# Altium footprint library S56_MLD_tiny.PcbLib: 13 footprints
Each footprint in its own frame and in the unit in brackets; x right, y up, seen from the top. Pads: shape width x height; smd on the part's side, far side on the other; paste and mask are expansions set on the pad; w line width, h text height; cw(c..) or ccw(c..) is an arc to the next point about the centre after c.
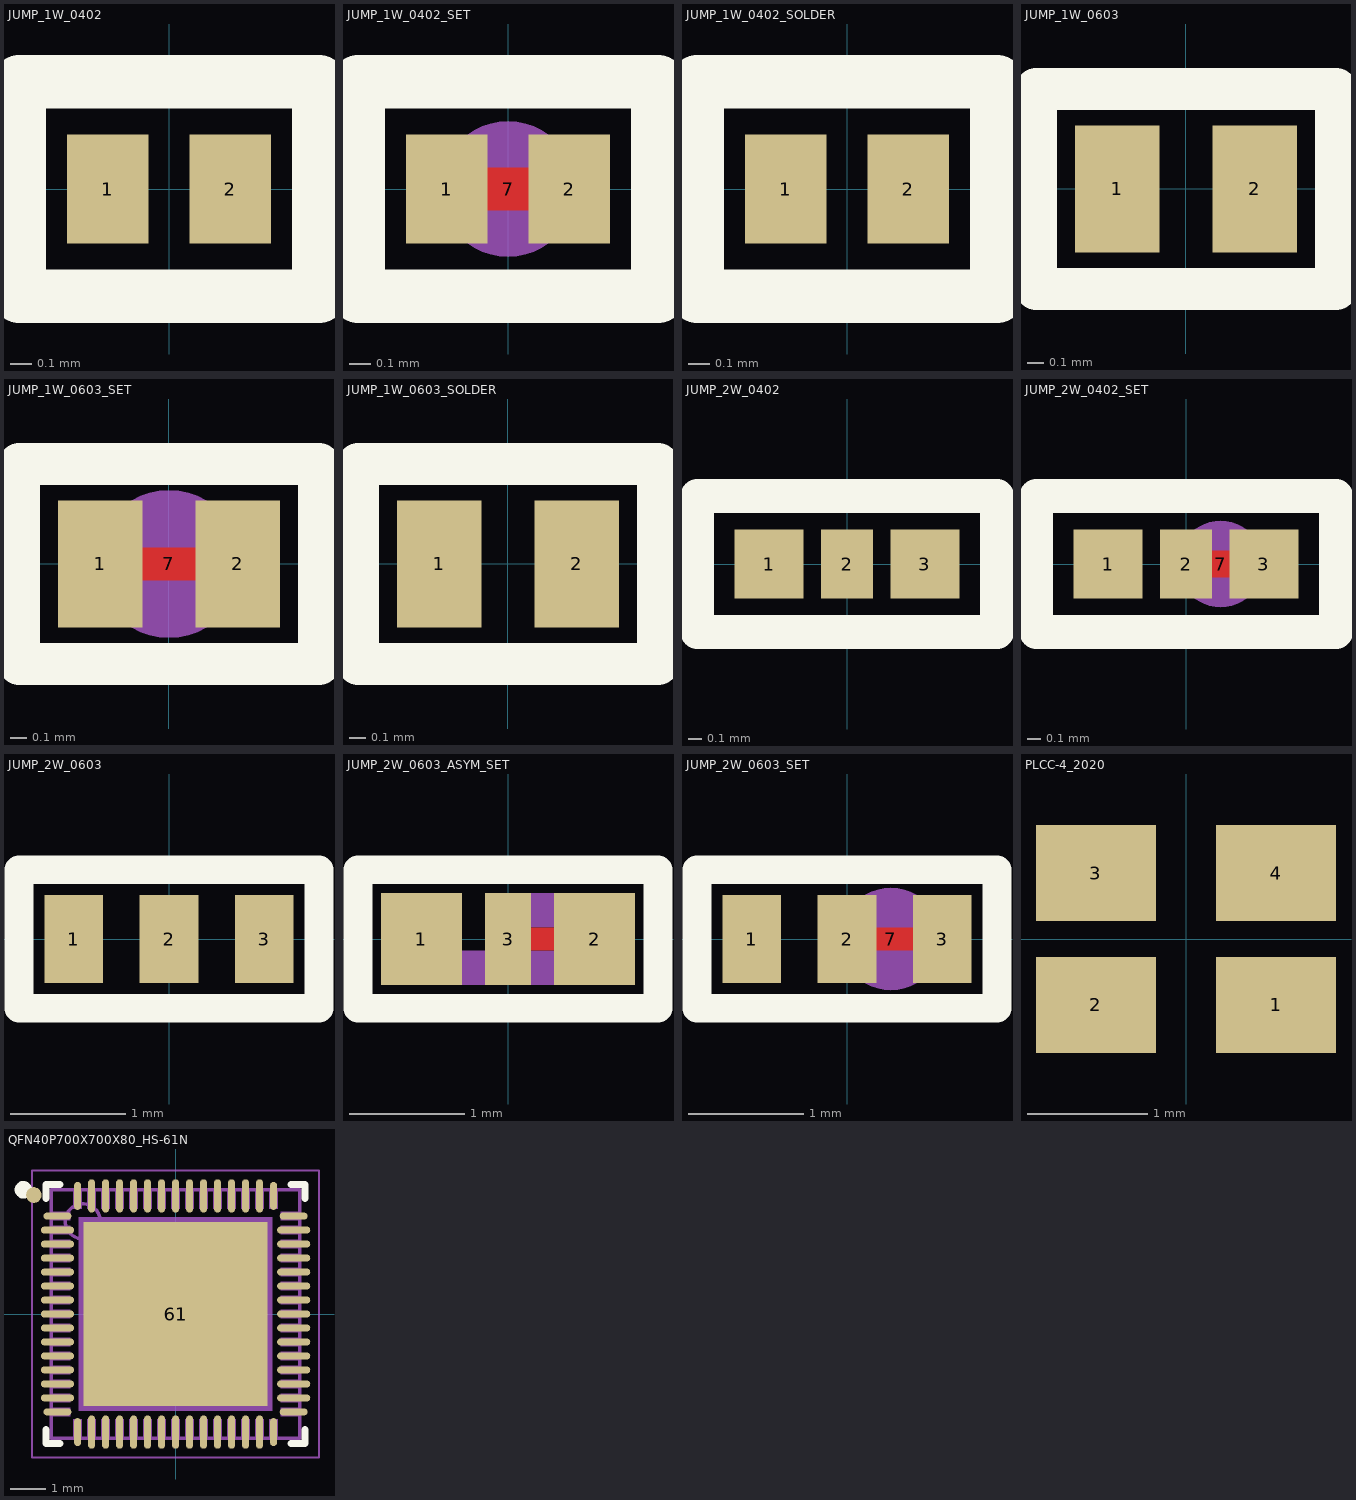
[diagram p0: the footprints below, top view; thin cyan lines are the x and y axes]

## JUMP_1W_0402 [mil]
pads (2):
  rect 15x20 smd paste-39.37: 1(-11.25,0) 2(11.25,0)
Top Overlay:
  lines w9.84: -27.56,-19.68 -27.56,19.68 27.56,19.68 27.56,-19.68 -27.56,-19.68
Top Solder:
  rectangle: -19.68,-11.81 19.68,11.81

## JUMP_1W_0402_SET [mil]
pads (3):
  rect 15x20 smd paste-39.37: 1(-11.25,0) 2(11.25,0)
  round 25 on Mech2: 7(0,0)
Top Layer:
  lines w7.87: -11.25,0 11.25,0
Top Overlay:
  lines w9.84: -27.56,-19.68 -27.56,19.68 27.56,19.68 27.56,-19.68 -27.56,-19.68
Top Solder:
  rectangle: -19.68,-11.81 19.68,7.87

## JUMP_1W_0402_SOLDER [mil]
pads (2):
  rect 15x20 smd paste-39.37: 1(-11.25,0) 2(11.25,0)
Top Overlay:
  lines w9.84: -27.56,-19.68 -27.56,19.68 27.56,19.68 27.56,-19.68 -27.56,-19.68
Top Paste:
  region: 10.83,10.83 -10.83,10.83 -10.83,-10.83 10.83,-10.83
Top Solder:
  rectangle: -19.68,-11.81 19.68,11.81
3D body: height 9.84, standoff -9.84, extent -9.84,-9.69 9.85,9.7

## JUMP_1W_0603 [mil]
pads (2):
  rect 20x30 smd paste-39.37: 1(-16.25,0) 2(16.25,0)
Top Overlay:
  lines w9.84: -35.43,-23.62 -35.43,23.62 35.43,23.62 35.43,-23.62 -35.43,-23.62
Top Solder:
  rectangle: -11.81,-17.72 11.81,17.72

## JUMP_1W_0603_SET [mil]
pads (3):
  rect 20x30 smd paste-39.37: 1(-16.25,0) 2(16.25,0)
  round 35 on Mech2: 7(0,0)
Top Layer:
  lines w7.87: -16.25,0 16.25,0
Top Overlay:
  lines w9.84: -35.43,-23.62 35.43,-23.62 35.43,23.62 -35.43,23.62 -35.43,-23.62
Top Solder:
  rectangle: -11.81,-17.72 11.81,17.72

## JUMP_1W_0603_SOLDER [mil]
pads (2):
  rect 20x30 smd paste-39.37: 1(-16.25,0) 2(16.25,0)
Top Overlay:
  lines w9.84: -35.43,-23.62 35.43,-23.62 35.43,23.62 -35.43,23.62 -35.43,-23.62
Top Solder:
  rectangle: -11.81,-17.72 11.81,17.72
3D body: height 15.75, standoff -15.75, extent -15.75,-15.75 15.75,15.75

## JUMP_2W_0402 [mil]
pads (3):
  rect 20x20 smd paste-39.37: 1(-22.5,0) 3(22.5,0)
  rect 15x20 smd paste-39.37: 2(0,0)
Top Overlay:
  lines w9.84: -43.31,-19.68 -43.31,19.68 43.31,19.68 43.31,-19.68 -43.31,-19.68
Top Solder:
  rectangle: -35.43,-11.81 35.43,11.81

## JUMP_2W_0402_SET [mil]
pads (4):
  rect 20x20 smd paste-39.37: 1(-22.5,0) 3(22.5,0)
  rect 15x20 smd paste-39.37: 2(0,0)
  round 25 on Mech2: 7(10,0)
Top Layer:
  lines w7.87: 0,0 22.5,0
Top Overlay:
  lines w9.84: -43.31,-19.68 -43.31,19.68 43.31,19.68 43.31,-19.68 -43.31,-19.68
Top Solder:
  rectangle: -35.43,-11.81 35.43,11.81

## JUMP_2W_0603 [mil]
pads (3):
  rect 20x30 smd paste-39.37: 1(-32.5,0) 2(0,0) 3(32.5,0)
Top Overlay:
  lines w9.84: -51.18,-23.62 51.18,-23.62 51.18,23.62 -51.18,23.62 -51.18,-23.62
Top Solder:
  rectangle: 3.94,-17.72 27.56,17.72
  rectangle: -27.56,-17.72 -3.94,17.72

## JUMP_2W_0603_ASYM_SET [mm]
pads (3):
  rect 0.7x0.8 smd paste-1: 1(-0.75,0) 2(0.75,0)
  rect 0.4x0.8 smd paste-1: 3(0,0)
Top Layer:
  lines w0.2: 0.2,0 0.8,0
Top Overlay:
  lines w0.25: -1.3,-0.6 1.3,-0.6 1.3,0.6 0.5,0.6 -1.3,0.6 -1.3,-0.6
Mechanical 2:
  region: 0.8,-0.1 -0.8,-0.1 -0.8,-0.4 0.8,-0.4
  region: 0.9,0.4 -0.1,0.4 -0.1,0.1 0.9,0.1

## JUMP_2W_0603_SET [mil]
pads (4):
  rect 20x30 smd paste-39.37: 1(-32.5,0) 2(0,0) 3(32.5,0)
  round 35 on Mech2: 7(15,0)
Top Layer:
  lines w7.87: 0,0 32.5,0
Top Overlay:
  lines w9.84: -51.18,-23.62 51.18,-23.62 51.18,23.62 -51.18,23.62 -51.18,-23.62
Top Solder:
  rectangle: 3.94,-17.72 27.56,17.72
  rectangle: -27.56,-17.72 -3.94,17.72

## PLCC-4_2020 [mm]
pads (4):
  rect 1x0.8 smd: 1(0.75,-0.55) 2(-0.75,-0.55) 3(-0.75,0.55) 4(0.75,0.55)
3D body: height 0.4, standoff 0, extent -1,-1 1,1
3D body: height 0.9, standoff 0.4, extent -1,-1 1,1

## QFN40P700X700X80_HS-61N [mm] "QFN, 60-Leads, Body 7.00x7.00mm, Pitch 0.40mm, Thermal Pad 5.25x5.25mm, IPC Medium Density"
height 0.8
pads (62):
  oval 0.8x0.2 smd: 1(-3.375,2.8) 15(-3.375,-2.8) 31(3.375,-2.8) 45(3.375,2.8)
  oval 0.95x0.2 smd: 2(-3.375,2.4) 3(-3.375,2) 4(-3.375,1.6) 5(-3.375,1.2) 6(-3.375,0.8) 7(-3.375,0.4) 8(-3.375,0) 9(-3.375,-0.4) 10(-3.375,-0.8) 11(-3.375,-1.2) 12(-3.375,-1.6) 13(-3.375,-2) 14(-3.375,-2.4) 32(3.375,-2.4) 33(3.375,-2) 34(3.375,-1.6) 35(3.375,-1.2) 36(3.375,-0.8) 37(3.375,-0.4) 38(3.375,0) 39(3.375,0.4) 40(3.375,0.8) 41(3.375,1.2) 42(3.375,1.6) 43(3.375,2) 44(3.375,2.4)
  oval 0.2x0.8 smd: 16(-2.8,-3.375) 30(2.8,-3.375) 46(2.8,3.375) 60(-2.8,3.375)
  oval 0.2x0.95 smd: 17(-2.4,-3.375) 18(-2,-3.375) 19(-1.6,-3.375) 20(-1.2,-3.375) 21(-0.8,-3.375) 22(-0.4,-3.375) 23(0,-3.375) 24(0.4,-3.375) 25(0.8,-3.375) 26(1.2,-3.375) 27(1.6,-3.375) 28(2,-3.375) 29(2.4,-3.375) 47(2.4,3.375) 48(2,3.375) 49(1.6,3.375) 50(1.2,3.375) 51(0.8,3.375) 52(0.4,3.375) 53(0,3.375) 54(-0.4,3.375) 55(-0.8,3.375) 56(-1.2,3.375) 57(-1.6,3.375) 58(-2,3.375) 59(-2.4,3.375)
  rect 5.25x5.25 smd paste-20: 61(0,0)
  round 0.45 smd: ""(-4.05,3.4)
Top Overlay:
  circle w0.25: c-4.35,3.55 r0.125
  lines w0.2: -3.7,-3.3 -3.7,-3.7 -3.3,-3.7 ; -3.7,3.3 -3.7,3.7 -3.3,3.7 ; 3.3,-3.7 3.7,-3.7 3.7,-3.3 ; 3.3,3.7 3.7,3.7 3.7,3.3
Top Paste:
  rectangle: -2.5,1.6 -1.6,2.5
  rectangle: -1.1,1.6 -0.2,2.5
  region: 2.5,2.5 1.6,2.5 1.6,1.6 2.5,1.6
  region: 1.1,2.5 0.2,2.5 0.2,1.6 1.1,1.6
  rectangle: -2.5,-2.5 -1.6,-1.6
  region: 2.5,-1.6 1.6,-1.6 1.6,-2.5 2.5,-2.5
  rectangle: -1.1,-2.5 -0.2,-1.6
  region: 1.1,-1.6 0.2,-1.6 0.2,-2.5 1.1,-2.5
  region: 2.5,-1.1 2.5,-0.2 1.6,-0.2 1.6,-1.1
  region: 1.6,1.1 1.6,0.2 2.5,0.2 2.5,1.1
  region: -1.6,-1.1 -1.6,-0.2 -2.5,-0.2 -2.5,-1.1
  region: -2.5,1.1 -2.5,0.2 -1.6,0.2 -1.6,1.1
  rectangle: -1.1,-1.1 -0.2,-0.2
  region: 1.1,-0.2 0.2,-0.2 0.2,-1.1 1.1,-1.1
  rectangle: -1.1,0.2 -0.2,1.1
  region: 1.1,1.1 0.2,1.1 0.2,0.2 1.1,0.2
Mechanical 2:
  rectangle: 3.2,-2.875 3.5,-2.725
  rectangle: 3.2,-2.475 3.5,-2.325
  rectangle: 3.2,-2.075 3.5,-1.925
  rectangle: 3.2,-1.675 3.5,-1.525
  rectangle: 3.2,-1.275 3.5,-1.125
  rectangle: 3.2,-0.875 3.5,-0.725
  rectangle: 3.2,-0.475 3.5,-0.325
  rectangle: 3.2,-0.075 3.5,0.075
  rectangle: 3.2,0.325 3.5,0.475
  rectangle: 3.2,0.725 3.5,0.875
  rectangle: 3.2,1.125 3.5,1.275
  rectangle: 3.2,1.525 3.5,1.675
  rectangle: 3.2,1.925 3.5,2.075
  rectangle: 3.2,2.725 3.5,2.875
  rectangle: 3.2,2.325 3.5,2.475
  region: -2.875,-3.2 -2.875,-3.5 -2.725,-3.5 -2.725,-3.2
  region: -2.475,-3.2 -2.475,-3.5 -2.325,-3.5 -2.325,-3.2
  region: -2.075,-3.2 -2.075,-3.5 -1.925,-3.5 -1.925,-3.2
  region: -1.675,-3.2 -1.675,-3.5 -1.525,-3.5 -1.525,-3.2
  region: -1.275,-3.2 -1.275,-3.5 -1.125,-3.5 -1.125,-3.2
  region: -0.875,-3.2 -0.875,-3.5 -0.725,-3.5 -0.725,-3.2
  region: -0.475,-3.2 -0.475,-3.5 -0.325,-3.5 -0.325,-3.2
  region: -0.075,-3.2 -0.075,-3.5 0.075,-3.5 0.075,-3.2
  region: 0.325,-3.2 0.325,-3.5 0.475,-3.5 0.475,-3.2
  region: 0.725,-3.2 0.725,-3.5 0.875,-3.5 0.875,-3.2
  region: 1.125,-3.2 1.125,-3.5 1.275,-3.5 1.275,-3.2
  region: 1.525,-3.2 1.525,-3.5 1.675,-3.5 1.675,-3.2
  region: 1.925,-3.2 1.925,-3.5 2.075,-3.5 2.075,-3.2
  region: 2.725,-3.2 2.725,-3.5 2.875,-3.5 2.875,-3.2
  region: 2.325,-3.2 2.325,-3.5 2.475,-3.5 2.475,-3.2
  region: -3.2,2.875 -3.5,2.875 -3.5,2.725 -3.2,2.725
  region: -3.2,2.475 -3.5,2.475 -3.5,2.325 -3.2,2.325
  region: -3.2,2.075 -3.5,2.075 -3.5,1.925 -3.2,1.925
  region: -3.2,1.675 -3.5,1.675 -3.5,1.525 -3.2,1.525
  region: -3.2,1.275 -3.5,1.275 -3.5,1.125 -3.2,1.125
  region: -3.2,0.875 -3.5,0.875 -3.5,0.725 -3.2,0.725
  region: -3.2,0.475 -3.5,0.475 -3.5,0.325 -3.2,0.325
  region: -3.2,0.075 -3.5,0.075 -3.5,-0.075 -3.2,-0.075
  region: -3.2,-0.325 -3.5,-0.325 -3.5,-0.475 -3.2,-0.475
  region: -3.2,-0.725 -3.5,-0.725 -3.5,-0.875 -3.2,-0.875
  region: -3.2,-1.125 -3.5,-1.125 -3.5,-1.275 -3.2,-1.275
  region: -3.2,-1.525 -3.5,-1.525 -3.5,-1.675 -3.2,-1.675
  region: -3.2,-1.925 -3.5,-1.925 -3.5,-2.075 -3.2,-2.075
  region: -3.2,-2.725 -3.5,-2.725 -3.5,-2.875 -3.2,-2.875
  region: -3.2,-2.325 -3.5,-2.325 -3.5,-2.475 -3.2,-2.475
  region: 2.875,3.2 2.875,3.5 2.725,3.5 2.725,3.2
  region: 2.475,3.2 2.475,3.5 2.325,3.5 2.325,3.2
  region: 2.075,3.2 2.075,3.5 1.925,3.5 1.925,3.2
  region: 1.675,3.2 1.675,3.5 1.525,3.5 1.525,3.2
  region: 1.275,3.2 1.275,3.5 1.125,3.5 1.125,3.2
  region: 0.875,3.2 0.875,3.5 0.725,3.5 0.725,3.2
  region: 0.475,3.2 0.475,3.5 0.325,3.5 0.325,3.2
  region: 0.075,3.2 0.075,3.5 -0.075,3.5 -0.075,3.2
  region: -0.325,3.2 -0.325,3.5 -0.475,3.5 -0.475,3.2
  region: -0.725,3.2 -0.725,3.5 -0.875,3.5 -0.875,3.2
  region: -1.125,3.2 -1.125,3.5 -1.275,3.5 -1.275,3.2
  region: -1.525,3.2 -1.525,3.5 -1.675,3.5 -1.675,3.2
  region: -1.925,3.2 -1.925,3.5 -2.075,3.5 -2.075,3.2
  region: -2.725,3.2 -2.725,3.5 -2.875,3.5 -2.875,3.2
  region: -2.325,3.2 -2.325,3.5 -2.475,3.5 -2.475,3.2
  region: 2.475,2.475 -2.475,2.475 -2.475,-2.475 2.475,-2.475
Mechanical 13:
  circle w0.1: c-2.65,2.65 r0.5
  lines w0.1: -3.55,-3.55 -3.55,3.55 3.55,3.55 3.55,-3.55 -3.55,-3.55
Mechanical 15:
  lines w0.05: -4.1,-4.1 -4.1,4.1 4.1,4.1 4.1,-4.1 -4.1,-4.1
  lines w0.1: -0.5,0 0.5,0 ; 0,-0.5 0,0.5
Mechanical 17:
  region: -2.925,-3 -2.925,-3.5 -2.675,-3.5 -2.675,-3
  region: -2.525,-3 -2.525,-3.5 -2.275,-3.5 -2.275,-3
  region: 2.675,-3 2.675,-3.5 2.925,-3.5 2.925,-3
  region: 2.275,-3 2.275,-3.5 2.525,-3.5 2.525,-3
  region: 1.875,-3 1.875,-3.5 2.125,-3.5 2.125,-3
  region: 1.075,-3 1.075,-3.5 1.325,-3.5 1.325,-3
  region: 1.475,-3 1.475,-3.5 1.725,-3.5 1.725,-3
  region: 0.275,-3 0.275,-3.5 0.525,-3.5 0.525,-3
  region: 0.675,-3 0.675,-3.5 0.925,-3.5 0.925,-3
  region: -2.125,-3 -2.125,-3.5 -1.875,-3.5 -1.875,-3
  region: -1.725,-3 -1.725,-3.5 -1.475,-3.5 -1.475,-3
  region: -1.325,-3 -1.325,-3.5 -1.075,-3.5 -1.075,-3
  region: -0.925,-3 -0.925,-3.5 -0.675,-3.5 -0.675,-3
  region: -0.525,-3 -0.525,-3.5 -0.275,-3.5 -0.275,-3
  region: -0.125,-3 -0.125,-3.5 0.125,-3.5 0.125,-3
  region: -3,2.925 -3.5,2.925 -3.5,2.675 -3,2.675
  region: -3,2.525 -3.5,2.525 -3.5,2.275 -3,2.275
  region: -3,-2.675 -3.5,-2.675 -3.5,-2.925 -3,-2.925
  region: -3,-2.275 -3.5,-2.275 -3.5,-2.525 -3,-2.525
  region: -3,-1.875 -3.5,-1.875 -3.5,-2.125 -3,-2.125
  region: -3,-1.075 -3.5,-1.075 -3.5,-1.325 -3,-1.325
  region: -3,-1.475 -3.5,-1.475 -3.5,-1.725 -3,-1.725
  region: -3,-0.275 -3.5,-0.275 -3.5,-0.525 -3,-0.525
  region: -3,-0.675 -3.5,-0.675 -3.5,-0.925 -3,-0.925
  region: -3,2.125 -3.5,2.125 -3.5,1.875 -3,1.875
  region: -3,1.725 -3.5,1.725 -3.5,1.475 -3,1.475
  region: -3,1.325 -3.5,1.325 -3.5,1.075 -3,1.075
  region: -3,0.925 -3.5,0.925 -3.5,0.675 -3,0.675
  region: -3,0.525 -3.5,0.525 -3.5,0.275 -3,0.275
  region: -3,0.125 -3.5,0.125 -3.5,-0.125 -3,-0.125
  region: 2.925,3 2.925,3.5 2.675,3.5 2.675,3
  region: 2.525,3 2.525,3.5 2.275,3.5 2.275,3
  region: -2.675,3 -2.675,3.5 -2.925,3.5 -2.925,3
  region: -2.275,3 -2.275,3.5 -2.525,3.5 -2.525,3
  region: -1.875,3 -1.875,3.5 -2.125,3.5 -2.125,3
  region: -1.075,3 -1.075,3.5 -1.325,3.5 -1.325,3
  region: -1.475,3 -1.475,3.5 -1.725,3.5 -1.725,3
  region: -0.275,3 -0.275,3.5 -0.525,3.5 -0.525,3
  region: -0.675,3 -0.675,3.5 -0.925,3.5 -0.925,3
  region: 2.125,3 2.125,3.5 1.875,3.5 1.875,3
  region: 1.725,3 1.725,3.5 1.475,3.5 1.475,3
  region: 1.325,3 1.325,3.5 1.075,3.5 1.075,3
  region: 0.925,3 0.925,3.5 0.675,3.5 0.675,3
  region: 0.525,3 0.525,3.5 0.275,3.5 0.275,3
  region: 0.125,3 0.125,3.5 -0.125,3.5 -0.125,3
  rectangle: 3,-2.925 3.5,-2.675
  rectangle: 3,-2.525 3.5,-2.275
  rectangle: 3,2.675 3.5,2.925
  rectangle: 3,2.275 3.5,2.525
  rectangle: 3,1.875 3.5,2.125
  rectangle: 3,1.075 3.5,1.325
  rectangle: 3,1.475 3.5,1.725
  rectangle: 3,0.275 3.5,0.525
  rectangle: 3,0.675 3.5,0.925
  rectangle: 3,-2.125 3.5,-1.875
  rectangle: 3,-1.725 3.5,-1.475
  rectangle: 3,-1.325 3.5,-1.075
  rectangle: 3,-0.925 3.5,-0.675
  rectangle: 3,-0.525 3.5,-0.275
  rectangle: 3,-0.125 3.5,0.125
  rectangle: -2.775,-2.775 2.775,2.775
3D body: height 0.8, standoff 0.01, extent -3.55,-3.55 3.55,3.55